# Altium footprint library standard-case.PcbLib: 285 footprints (part 18 of 18)
Each footprint in its own frame and in the unit in brackets; x right, y up, seen from the top. Pads: shape width x height; smd on the part's side, far side on the other; paste and mask are expansions set on the pad; w line width, h text height; cw(c..) or ccw(c..) is an arc to the next point about the centre after c.
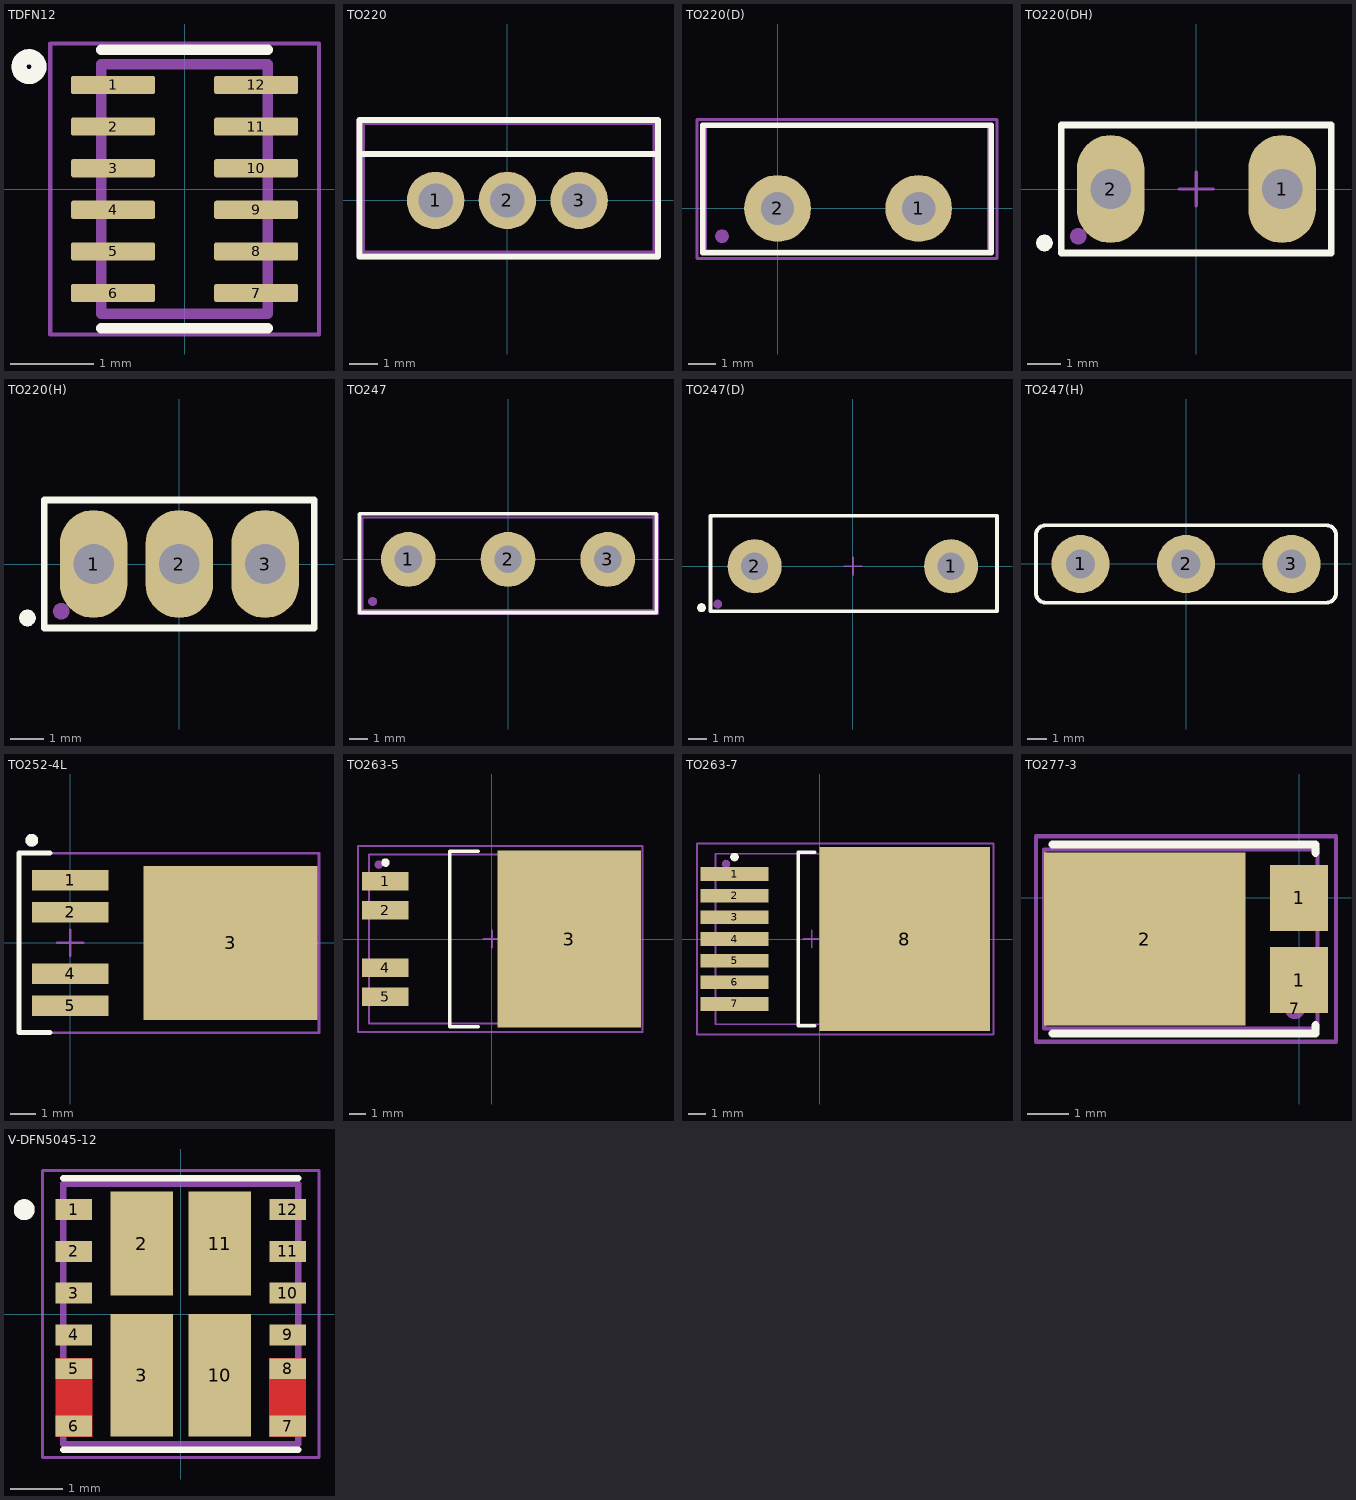
[diagram p17: the footprints below, top view; thin cyan lines are the x and y axes]

## TDFN12 [mm]
pads (12):
  rrect25% 1.01x0.22 smd: 1(-0.86,1.25) 2(-0.86,0.75) 3(-0.86,0.25) 4(-0.86,-0.25) 5(-0.86,-0.75) 6(-0.86,-1.25) 7(0.86,-1.25) 8(0.86,-0.75) 9(0.86,-0.25) 10(0.86,0.25) 11(0.86,0.75) 12(0.86,1.25)
Top Overlay:
  circle w0.18: c-1.87,1.47 r0.12
  lines w0.127: -1,-1.674 1,-1.674 ; -1,1.674 1,1.674
Mechanical 13:
  circle w0.18: c-1.87,1.47 r0.12
  lines w0.127: -1,-1.5 1,-1.5 1,1.5 -1,1.5 -1,-1.5
Mechanical 15:
  lines w0.05: -1.615,-1.75 1.615,-1.75 1.615,1.75 -1.615,1.75 -1.615,-1.75
3D body "step_temp.STEP": height 0.8, standoff 0, extent -1,-1.5 1,1.5

## TO220 [mm]
height 22
pads (3):
  round 2 hole 1.2: 1(-2.5,0) 2(0,0) 3(2.5,0)
Top Overlay:
  lines w0.2: -5.15,1.619 5.247,1.619 ; -5.15,-1.95 5.247,-1.95 5.247,2.8 -5.15,2.8 -5.15,-1.95
Mechanical 1:
  lines w0.1: -5,1.6 5.1,1.6 ; -5,-1.8 -5,2.675 5.1,2.675 5.1,-1.8 -5,-1.8
Mechanical 15:
  lines w0.1: -0.5,0 0.5,0 ; 0,-0.5 0,0.5 ; -5.2,-2 5.247,-2 5.247,2.8 -5.2,2.8 -5.2,-2
3D body "User Library-TO-220-4.STEP": height 22.06, standoff -6.74, extent -5,-1.8 5.2,2.7

## TO220(D) [mm]
pads (3):
  round 2.4 hole 1.2: 1(5.08,0) 2(0,0)
  round 0.5 on Mech1: ""(-2,-1)
Top Overlay:
  lines w0.2: -2.7,-1.6 7.7,-1.6 7.7,3 -2.7,3 -2.7,-1.6
Mechanical 1:
  lines w0.1: -2.59,-1.533 7.59,-1.533 7.59,2.977 -2.59,2.977 -2.59,-1.533
Mechanical 15:
  lines w0.1: -2.9,-1.8 -2.9,3.2 7.9,3.2 7.9,-1.8 -2.9,-1.8
3D body "TO-220FPAC.stp": height 21.15, standoff -8.45, extent -2.59,-1.533 7.59,2.977

## TO220(DH) [mm]
pads (4):
  oval 2x3.2 hole 1.2: 1(2.54,0) 2(-2.54,0)
  round 0.5 on Top Overlay: ""(-4.5,-1.6)
  round 0.5 on Mech1: ""(-3.5,-1.4)
Top Overlay:
  lines w0.2: -4,-1.9 4,-1.9 4,1.9 -4,1.9 -4,-1.9
Mechanical 1:
  lines w0.1: -4,-1.9 -4,1.9 4,1.9 4,-1.9 -4,-1.9
Mechanical 15:
  lines w0.1: -0.5,0 0.5,0 ; 0,-0.5 0,0.5
3D body "TO220-2-90.STEP": height 5.98, standoff -8, extent -5.08,-0.225 5.08,21.665

## TO220(H) [mm]
height 22
pads (5):
  oval 2x3.2 hole 1.2: 1(-2.54,0) 2(0,0) 3(2.54,0)
  round 0.5 on Top Overlay: ""(-4.5,-1.6)
  round 0.5 on Mech1: ""(-3.5,-1.4)
Top Overlay:
  lines w0.2: -4,-1.9 -4,1.9 4,1.9 4,-1.9 -4,-1.9
Mechanical 1:
  lines w0.1: -4,-1.9 4,-1.9 4,1.9 -4,1.9 -4,-1.9
Mechanical 15:
  lines w0.1: -0.5,0 0.5,0 ; 0,-0.5 0,0.5
3D body "TO-220-90.STEP": height 2.76, standoff -7.91, extent -4.95,-0.365 4.95,20.665

## TO247 [mm] "3-Lead Plastic TO-247"
height 20
pads (4):
  round 3 hole 1.5: 1(-5.45,0) 2(0,0) 3(5.45,0)
  round 0.5 on Mech1: ""(-7.4,-2.3)
Top Overlay:
  lines w0.2: -8.1,-2.9 -8.1,2.5 8.1,2.5 8.1,-2.9 -8.1,-2.9
Mechanical 1:
  lines w0.1: -7.95,2.3 -7.95,2.3 ; -7.95,2.3 -7.95,-2.75 7.95,-2.75 7.95,2.35 7.9,2.3 -7.95,2.3
Mechanical 15:
  lines w0.1: -0.5,0 0.5,0 ; 0,-0.5 0,0.5 ; -8.2,-3 8.2,-3 8.2,2.5 -8.2,2.5 -8.2,-3
3D body "TO247_3_21.STEP": height 26.95, standoff -2.47, extent -7.95,-2.75 7.95,2.35

## TO247(D) [mm] "3-Lead Plastic TO-247"
height 20
pads (4):
  round 3 hole 1.5: 1(5.45,0) 2(-5.45,0)
  round 0.5 on Top Overlay: ""(-8.4,-2.3)
  round 0.5 on Mech1: ""(-7.5,-2.1)
Top Overlay:
  lines w0.2: -7.9,-2.5 -7.9,2.8 8,2.8 8,-2.5 -7.9,-2.5
Mechanical 1:
  lines w0.1: -7.9,-2.5 -7.9,2.8 8,2.8 8,-2.5 -7.9,-2.5
Mechanical 15:
  lines w0.1: -0.5,0 0.5,0 ; 0,-0.5 0,0.5 ; -7.9,-2.5 8,-2.5 8,2.8 -7.9,2.8 -7.9,-2.5
3D body "User Library-User Library-TO-247_NO_CENTER_LEAD.STEP": height 30.5, standoff -5.9, extent -7.95,-2.5 7.95,2.81

## TO247(H) [mm] "3-Lead Plastic TO-247"
height 20
pads (3):
  round 3 hole 1.5: 1(-5.45,0) 2(0,0) 3(5.45,0)
Top Overlay:
  lines w0.2: -7.75,-1.5 ccw(c-7.25,-1.5) -7.25,-2 7.25,-2 ccw(c7.25,-1.5) 7.75,-1.5 7.75,1.5 ccw(c7.25,1.5) 7.25,2 -7.25,2 ccw(c-7.25,1.5) -7.75,1.5 -7.75,-1.5
Mechanical 1:
  lines w0.1: -7.75,-1.5 ccw(c-7.25,-1.5) -7.25,-2 7.25,-2 ccw(c7.25,-1.5) 7.75,-1.5 7.75,1.5 ccw(c7.25,1.5) 7.25,2 -7.25,2 ccw(c-7.25,1.5) -7.75,1.5 -7.75,-1.5
Mechanical 15:
  lines w0.1: -0.5,0 0.5,0 ; 0,-0.5 0,0.5 ; -7.75,-1.5 ccw(c-7.25,-1.5) -7.25,-2 7.25,-2 ccw(c7.25,-1.5) 7.75,-1.5 7.75,1.5 ccw(c7.25,1.5) 7.25,2 -7.25,2 ccw(c-7.25,1.5) -7.75,1.5 -7.75,-1.5
3D body "User Library-TO-247H.STEP": height 3.9, standoff -8, extent -7.75,-0.3 7.75,28.1

## TO252-4L [mm] "Dual DPAK 4L"
height 4.65
pads (6):
  rect 3x0.8 smd: 1(0,2.45) 2(0,1.2) 4(0,-1.2) 5(0,-2.45)
  rect 6.8x6 smd: 3(6.25,0)
  round 0.5 on Mech1: ""(-1.5,4)
Top Overlay:
  circle w0.25: c-1.5,4 r0.125
  lines w0.2: -0.8,-3.5 -2,-3.5 -2,3.5 -0.8,3.5
Mechanical 1:
  lines w0.1: -2,-3.5 -2,3.5 9.7,3.5 9.7,-3.5 -2,-3.5
Mechanical 15:
  lines w0.1: -0.5,0 0.5,0 ; 0,-0.5 0,0.5 ; -2,-3.5 9.7,-3.5 9.7,3.5 -2,3.5 -2,-3.5
3D body "to252-4_p1-27_l6-8_w5-8.stp": height 2.41, standoff 0, extent -0.9,-3.4 9.3,3.4

## TO263-5 [mm]
height 4.65
pads (6):
  rect 2.75x1.1 smd: 1(-6.3,3.42) 2(-6.3,1.71) 4(-6.3,-1.71) 5(-6.3,-3.42)
  rect 8.5x10.5 smd: 3(4.572,0)
  round 0.5 on Mech1: ""(-6.7,4.4)
Top Overlay:
  circle w0.25: c-6.3,4.52 r0.125
  lines w0.2: -0.8,-5.2 -2.5,-5.2 -2.5,5.2 -0.8,5.2
Mechanical 1:
  lines w0.1: -7.276,-5 -7.276,5 8.394,5 8.394,-5 -7.276,-5
Mechanical 15:
  lines w0.1: -0.5,0 0.5,0 ; 0,-0.5 0,0.5 ; -7.925,-5.5 8.9,-5.5 8.9,5.5 -7.925,5.5 -7.925,-5.5
3D body "TO263-5S.STEP": height 4.93, standoff 0.13, extent -7.276,-5 8.394,5

## TO263-7 [mm] "TO263-7 (D2Pak, 7-Pads)"
height 4.6
pads (9):
  rect 4x0.8 smd paste+0: 1(-5,3.81) 4(-5,0)
  rect 4x0.8 smd: 2(-5,2.54) 3(-5,1.27) 5(-5,-1.27) 6(-5,-2.54) 7(-5,-3.81)
  rect 10x10.8 smd: 8(5,0)
  round 0.5 on Mech1: ""(-5.5,4.4)
Top Overlay:
  circle w0.25: c-5,4.81 r0.125
  lines w0.2: -0.3,-5.08 -1.25,-5.08 -1.25,5.08 -0.3,5.08
Mechanical 1:
  lines w0.1: -6.117,-5 -6.117,5 9.553,5 9.553,-5 -6.117,-5
Mechanical 15:
  lines w0.1: -0.974,0 0.026,0 ; -0.472,-0.5 -0.472,0.5 ; -7.2,-5.6 -7.195,5.6 10.2,5.6 10.2,-5.6 -7.2,-5.6
3D body "TO263-7-1.STEP": height 4.83, standoff 0.03, extent -6.117,-5 9.553,5

## TO277-3 [mm]
pads (4):
  rect 1.4x1.6 smd: 1(0,-2) 1(0,0)
  rect 4.9x4.2 smd: 2(-3.75,-1)
  round 0.5 on Mech1: 7(-0.1,-2.7)
Top Overlay:
  lines w0.2: -6,-3.3 0.4,-3.3 0.4,-3.1 ; -6,1.3 0.4,1.3 0.4,1.1
Mechanical 1:
  lines w0.1: -6.2,1.175 -6.2,-3.175 0.45,-3.175 0.45,1.175 -6.2,1.175 ; -6.2,1.175 -6.2,1.175
Mechanical 15:
  lines w0.1: -6.4,-3.5 -6.4,1.5 0.9,1.5 0.9,-3.5 -6.4,-3.5
3D body "TO-277_3L.stp": height 1.25, standoff 0, extent -6.2,-3.175 0.45,1.175

## V-DFN5045-12 [mm] "MOSFET"
pads (16):
  rect 0.7x0.4 smd: 1(-2.05,2) 2(-2.05,1.2) 3(-2.05,0.4) 4(-2.05,-0.4) 5(-2.05,-1.05) 6(-2.05,-2.15) 7(2.05,-2.15) 8(2.05,-1.05) 9(2.05,-0.4) 10(2.05,0.4) 11(2.05,1.2) 12(2.05,2)
  rect 1.2x2 smd: 2(-0.75,1.35) 11(0.75,1.35)
  rect 1.2x2.35 smd: 3(-0.75,-1.175) 10(0.75,-1.175)
Top Layer:
  region: 1.7,-0.85 1.7,-2.35 2.4,-2.35 2.4,-0.85
  region: -2.4,-0.85 -2.4,-2.35 -1.7,-2.35 -1.7,-0.85
Top Overlay:
  circle w0.2: c-3,2 r0.1
  lines w0.127: -2.25,-2.6 2.25,-2.6 ; -2.25,2.6 2.25,2.6
Mechanical 13:
  circle w0.2: c-3,2 r0.1
  lines w0.127: -2.25,-2.5 2.25,-2.5 2.25,2.5 -2.25,2.5 -2.25,-2.5
Mechanical 15:
  lines w0.05: -2.65,-2.75 -2.65,2.75 2.65,2.75 2.65,-2.75 -2.65,-2.75
3D body "FDMQ8403.STEP": height 0.8, standoff 0, extent -2.25,-2.5 2.25,2.5